# Altium footprint library basicfootprints.PcbLib: 522 footprints (part 20 of 33)
Each footprint in its own frame and in the unit in brackets; x right, y up, seen from the top. Pads: shape width x height; smd on the part's side, far side on the other; paste and mask are expansions set on the pad; w line width, h text height; cw(c..) or ccw(c..) is an arc to the next point about the centre after c.
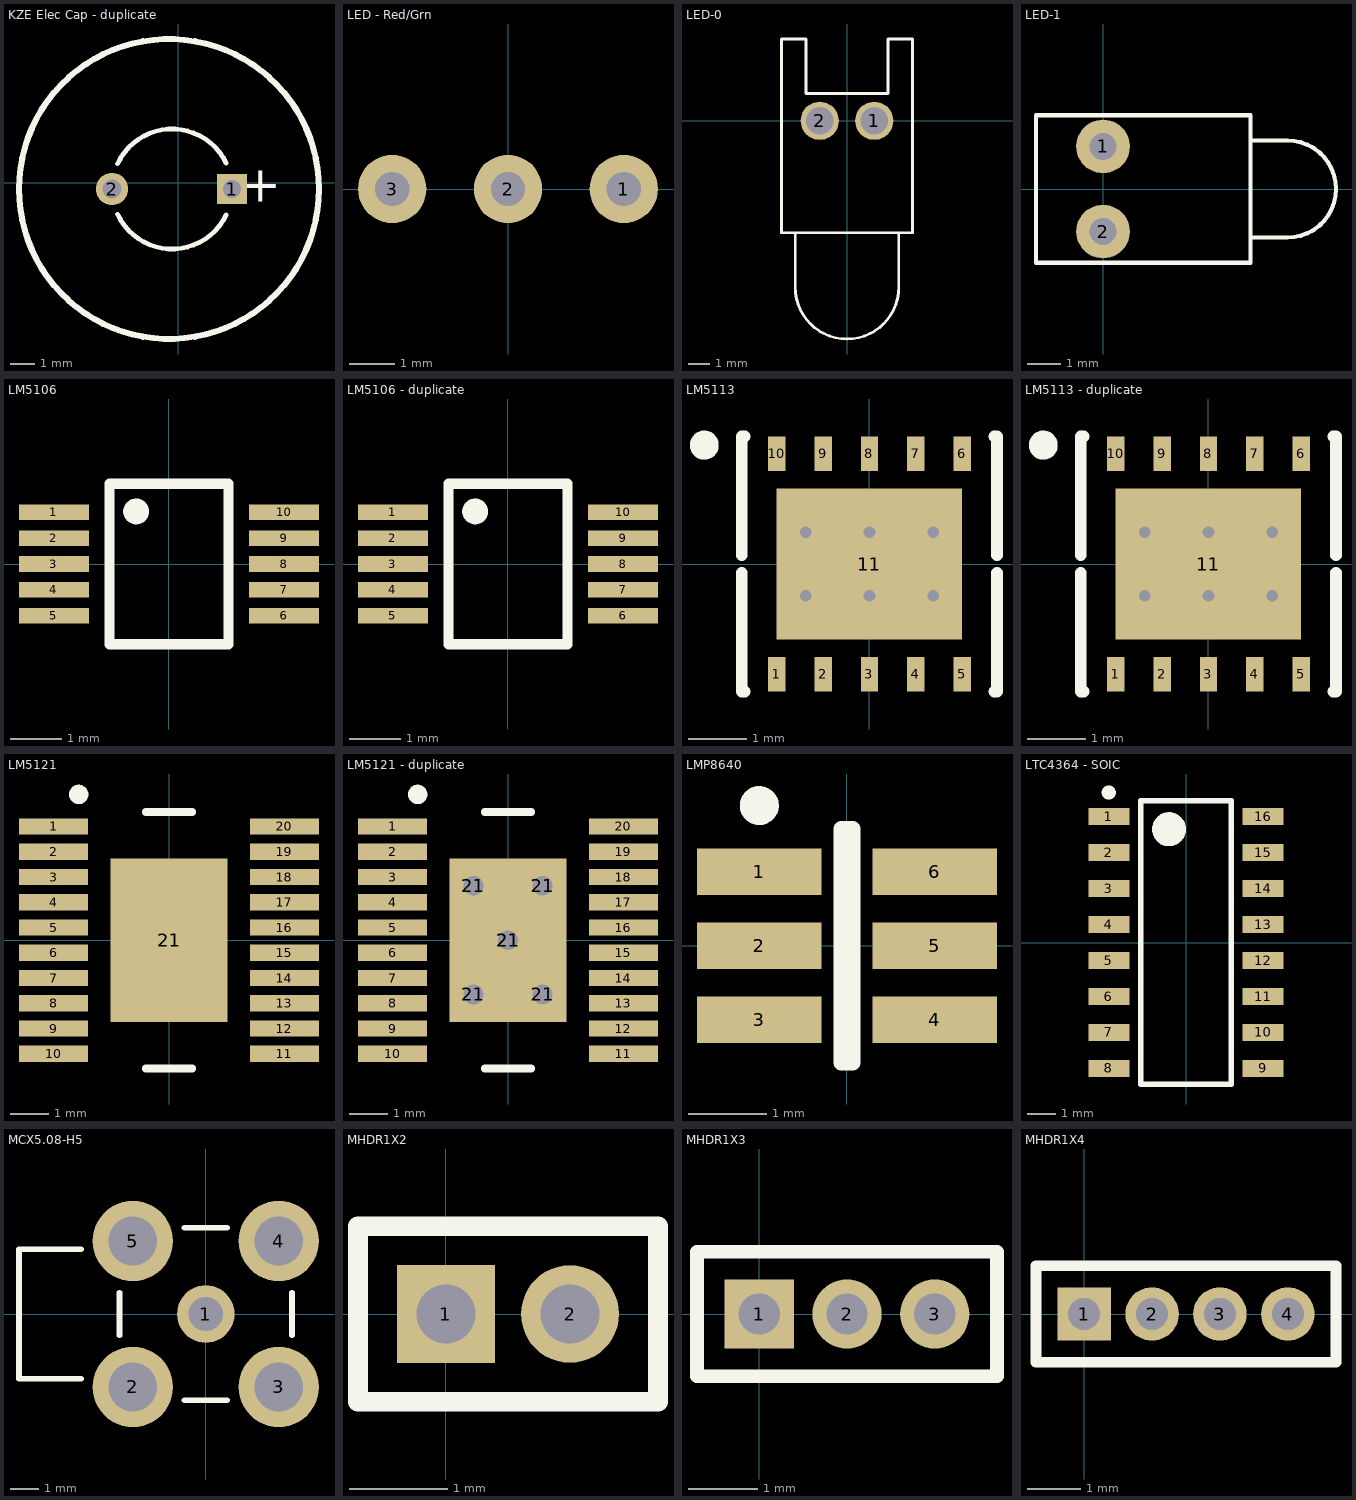
[diagram p19: the footprints below, top view; thin cyan lines are the x and y axes]

## KZE Elec Cap - duplicate [mm] "KZE Series 12.5Phi"
pads (2):
  rect 1.25x1.25 hole 0.75: 1(2.246,-0.254)
  round 1.35 hole 0.8: 2(-2.754,-0.254)
Top Overlay:
  circle w0.254: c-0.381,-0.254 r6.25
  lines w0.2: -2.523,-1.304 ccw(c-0.254,-0.254) 2.003,-1.329 ; -2.523,0.796 cw(c-0.254,-0.254) 2.003,0.821
  text "+" at 4.296,0.496 h1.5
3D body: height 31, standoff 1, extent -6.604,-6.604 5.847,5.871

## LED - Red/Grn [mm] "LTL-1BEHJ"
pads (3):
  round 1.5 hole 0.75: 1(2.54,0) 2(0,0) 3(-2.54,0)
3D body: height 6.65, standoff 1.5, extent -1.5,-1.499 1.5,1.499

## LED-0 [mil] "LED; 2 Leads"
pads (2):
  round 70 hole 50: 1(50,0) 2(-50,0)
Top Overlay:
  lines w5: -95,-205 -95,-305 ccw(c0,-305) 95,-305 95,-205 ; -120,-205 120,-205 120,150 75,150 75,50 -75,50 -75,150 -120,150 -120,-205

## LED-1 [mm] "LED; 2 Leads"
pads (2):
  round 1.6 hole 0.8: 1(0,1.27) 2(0,-1.27)
Top Overlay:
  lines w0.127: 4.4,-1.45 5.5,-1.45 ccw(c5.5,0) 5.5,1.45 4.4,1.45 ; -2,-2.2 4.4,-2.2 4.4,2.2 -2,2.2 -2,-2.2

## LM5106 [mm] "Gate Driver 100v, Adaptive Delay"
height 1.1
pads (10):
  rect 1.35x0.3 smd mask+0.05: 1(-2.225,1) 2(-2.225,0.5) 3(-2.225,0) 4(-2.225,-0.5) 5(-2.225,-1) 6(2.225,-1) 7(2.225,-0.5) 8(2.225,0) 9(2.225,0.5) 10(2.225,1)
Top Overlay:
  circle w0.25: c-0.635,1.016 r0.125
  lines w0.2: -1.15,-1.55 -1.15,1.55 1.15,1.55 1.15,-1.55 -1.15,-1.55
3D body: height 1.1, standoff 0.05, extent -1.55,-1.55 1.55,1.55

## LM5106 - duplicate [mm] "Gate Driver 100v, Adaptive Delay"
height 1.1
pads (10):
  rect 1.35x0.3 smd mask+0.05: 1(-2.225,1) 2(-2.225,0.5) 3(-2.225,0) 4(-2.225,-0.5) 5(-2.225,-1) 6(2.225,-1) 7(2.225,-0.5) 8(2.225,0) 9(2.225,0.5) 10(2.225,1)
Top Overlay:
  circle w0.25: c-0.635,1.016 r0.125
  lines w0.2: -1.15,-1.55 -1.15,1.55 1.15,1.55 1.15,-1.55 -1.15,-1.55
3D body: height 1.1, standoff 0.05, extent -1.55,-1.55 1.55,1.55

## LM5113 [mm] "GaNFET Driver"
height 0.8
pads (11):
  rect 0.3x0.6 smd mask+0.05: 1(-1.6,-1.9) 2(-0.8,-1.9) 3(0,-1.9) 4(0.8,-1.9) 5(1.6,-1.9) 6(1.6,1.9) 7(0.8,1.9) 8(0,1.9) 9(-0.8,1.9) 10(-1.6,1.9)
  rect 3.2x2.6 smd mask+0.05: 11(0,0)
via -1.1,0.55 diameter 0.5 hole 0.2
via 0,0.55 diameter 0.5 hole 0.2
via 1.1,0.55 diameter 0.5 hole 0.2
via -1.1,-0.55 diameter 0.5 hole 0.2
via 0,-0.55 diameter 0.5 hole 0.2
via 1.1,-0.55 diameter 0.5 hole 0.2
Top Overlay:
  circle w0.25: c-2.85,2.05 r0.125
  lines w0.2: -2.2,-0.15 -2.2,-2.2 -2.15,-2.2 ; -2.2,0.15 -2.2,2.2 -2.15,2.2 ; 2.15,-2.2 2.2,-2.2 2.2,-0.15 ; 2.15,2.2 2.2,2.2 2.2,0.15
3D body: height 0.8, standoff 0.1, extent -2.05,-2.05 2.05,2.05

## LM5113 - duplicate [mm] "GaNFET Driver"
height 0.8
pads (11):
  rect 0.3x0.6 smd mask+0.05: 1(-1.6,-1.9) 2(-0.8,-1.9) 3(0,-1.9) 4(0.8,-1.9) 5(1.6,-1.9) 6(1.6,1.9) 7(0.8,1.9) 8(0,1.9) 9(-0.8,1.9) 10(-1.6,1.9)
  rect 3.2x2.6 smd mask+0.05: 11(0,0)
via -1.1,0.55 diameter 0.5 hole 0.2
via 0,0.55 diameter 0.5 hole 0.2
via 1.1,0.55 diameter 0.5 hole 0.2
via -1.1,-0.55 diameter 0.5 hole 0.2
via 0,-0.55 diameter 0.5 hole 0.2
via 1.1,-0.55 diameter 0.5 hole 0.2
Top Overlay:
  circle w0.25: c-2.85,2.05 r0.125
  lines w0.2: -2.2,-0.15 -2.2,-2.2 -2.15,-2.2 ; -2.2,0.15 -2.2,2.2 -2.15,2.2 ; 2.15,-2.2 2.2,-2.2 2.2,-0.15 ; 2.15,2.2 2.2,2.2 2.2,0.15
3D body: height 0.8, standoff 0.1, extent -2.05,-2.05 2.05,2.05

## LM5121 [mm] "PWP0020A, 20 pin HTSSOP with thermal pad"
height 1.1
pads (21):
  rect 1.78x0.42 smd: 1(-2.97,2.925) 2(-2.97,2.275) 3(-2.97,1.625) 4(-2.97,0.975) 5(-2.97,0.325) 6(-2.97,-0.325) 7(-2.97,-0.975) 8(-2.97,-1.625) 9(-2.97,-2.275) 10(-2.97,-2.925) 11(2.97,-2.925) 12(2.97,-2.275) 13(2.97,-1.625) 14(2.97,-0.975) 15(2.97,-0.325) 16(2.97,0.325) 17(2.97,0.975) 18(2.97,1.625) 19(2.97,2.275) 20(2.97,2.925)
  rect 3x4.2 smd: 21(0,0)
Top Overlay:
  circle w0.25: c-2.325,3.75 r0.125
  lines w0.2: -0.6,-3.3 0.6,-3.3 ; -0.6,3.3 0.6,3.3
3D body: height 1.1, standoff 0.1, extent -2.25,-3.3 2.25,3.3

## LM5121 - duplicate [mm] "PWP0020A, 20 pin HTSSOP with thermal pad"
height 1.1
pads (26):
  rect 1.78x0.42 smd: 1(-2.97,2.925) 2(-2.97,2.275) 3(-2.97,1.625) 4(-2.97,0.975) 5(-2.97,0.325) 6(-2.97,-0.325) 7(-2.97,-0.975) 8(-2.97,-1.625) 9(-2.97,-2.275) 10(-2.97,-2.925) 11(2.97,-2.925) 12(2.97,-2.275) 13(2.97,-1.625) 14(2.97,-0.975) 15(2.97,-0.325) 16(2.97,0.325) 17(2.97,0.975) 18(2.97,1.625) 19(2.97,2.275) 20(2.97,2.925)
  round 1 hole 0.508: 21(-0.889,-1.397) 21(-0.889,1.397) 21(0,0) 21(0.889,-1.397) 21(0.889,1.397)
  rect 3x4.2 smd: 21(0,0)
Top Overlay:
  circle w0.25: c-2.325,3.75 r0.125
  lines w0.2: -0.6,-3.3 0.6,-3.3 ; -0.6,3.3 0.6,3.3
3D body: height 1.1, standoff 0.1, extent -2.25,-3.3 2.25,3.3

## LMP8640 [mm] "Current Sense Amplifier"
height 1.1
pads (6):
  rect 1.6x0.6 smd: 1(-1.125,0.95) 2(-1.125,0) 3(-1.125,-0.95) 4(1.125,-0.95) 5(1.125,0) 6(1.125,0.95)
Top Overlay:
  circle w0.25: c-1.125,1.8 r0.125
  lines w0.2: -0.075,-1.5 -0.075,1.5 0.075,1.5 0.075,-1.5 -0.075,-1.5
3D body: height 1.1, standoff 0.1, extent -0.875,-1.525 0.875,1.525

## LTC4364 - SOIC [mm] "Surge Stopper  with Ideal Diode"
height 1.75
pads (16):
  rect 1.45x0.6 smd: 1(-2.725,4.445) 2(-2.725,3.175) 3(-2.725,1.905) 4(-2.725,0.635) 5(-2.725,-0.635) 6(-2.725,-1.905) 7(-2.725,-3.175) 8(-2.725,-4.445) 9(2.725,-4.445) 10(2.725,-3.175) 11(2.725,-1.905) 12(2.725,-0.635) 13(2.725,0.635) 14(2.725,1.905) 15(2.725,3.175) 16(2.725,4.445)
Top Overlay:
  circle w0.25: c-2.725,5.295 r0.125
  circle w0.6: c-0.6,4 r0.3
  lines w0.2: -1.6,-5 -1.6,5 1.6,5 1.6,-5 -1.6,-5
3D body: height 1.75, standoff 0.1, extent -2,-5 2,5

## MCX5.08-H5 [mm] "Connector; RF Coaxial, MCX, Thru-Hole; 5 Position; Right-Angle"
height 5.85
pads (5):
  round 2 hole 1.2: 1(0,0)
  round 2.8 hole 1.7: 2(-2.54,-2.54) 3(2.54,-2.54) 4(2.54,2.54) 5(-2.54,2.54)
Top Overlay:
  lines w0.2: -4.34,-2.25 -6.5,-2.25 -6.5,2.25 -4.34,2.25 ; -3,-0.74 -3,0.74 ; -0.74,-3 0.74,-3 ; -0.74,3 0.74,3 ; 3,-0.74 3,0.74

## MHDR1X2 [mm] "Connector; Header; 2 Position"
pads (2):
  rect 1x1 hole 0.6: 1(0,0)
  round 1 hole 0.6: 2(1.27,0)
Top Overlay:
  lines w0.2: -0.9,-0.9 -0.9,0.9 2.17,0.9 2.17,-0.9 -0.9,-0.9

## MHDR1X3 [mm] "Connector; Header; 3 Position"
pads (3):
  rect 1x1 hole 0.6: 1(0,0)
  round 1 hole 0.6: 2(1.27,0) 3(2.54,0)
Top Overlay:
  lines w0.2: -0.9,-0.9 3.44,-0.9 3.44,0.9 -0.9,0.9 -0.9,-0.9

## MHDR1X4 [mm] "Connector; Header; 4 Position"
pads (4):
  rect 1x1 hole 0.6: 1(0,0)
  round 1 hole 0.6: 2(1.27,0) 3(2.54,0) 4(3.81,0)
Top Overlay:
  lines w0.2: -0.9,-0.9 -0.9,0.9 4.71,0.9 4.71,-0.9 -0.9,-0.9